# Altium footprint library PcbLib1.PcbLib: 37 footprints (part 3 of 3)
Each footprint in its own frame and in the unit in brackets; x right, y up, seen from the top. Pads: shape width x height; smd on the part's side, far side on the other; paste and mask are expansions set on the pad; w line width, h text height; cw(c..) or ccw(c..) is an arc to the next point about the centre after c.
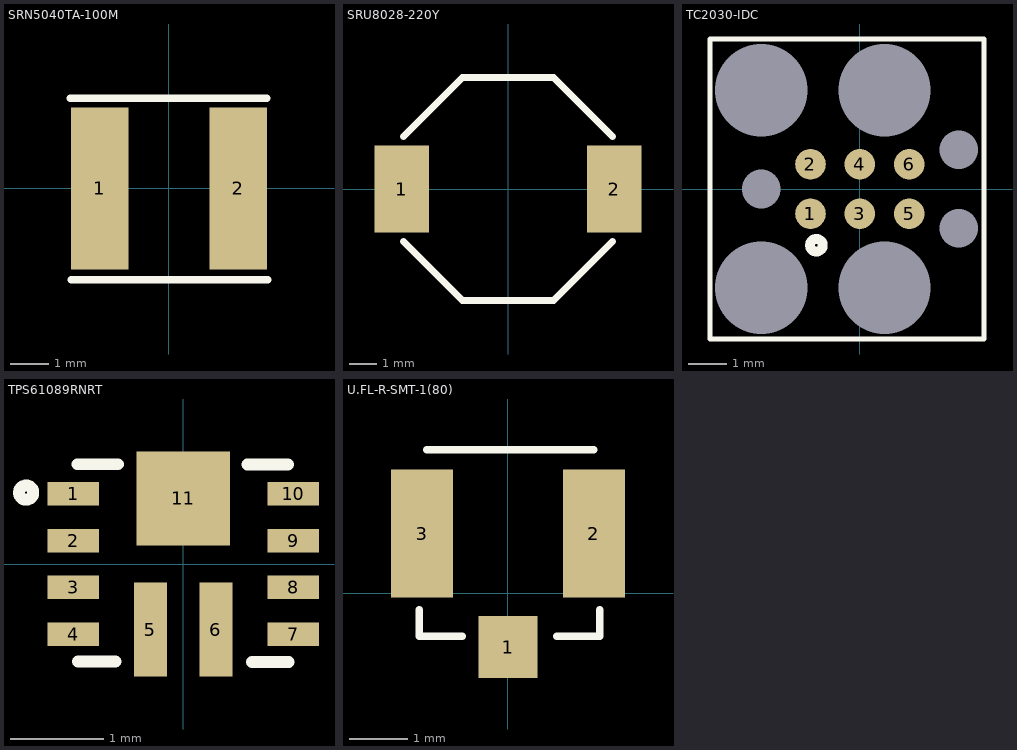
[diagram p2: the footprints below, top view; thin cyan lines are the x and y axes]

## SRN5040TA-100M [mm] "FIXED IND 10UH 2.2A 56 MOHM SMD"
pads (2):
  rect 1.5x4.2 smd: 1(-1.8,0) 2(1.8,0)
Top Overlay:
  lines w0.2: -2.563,2.347 2.538,2.347 ; -2.538,-2.373 2.567,-2.373
3D body "User Library-Bourns_SRN5040TA_series.STEP": height 4.1, standoff 0, extent -2.6,-2.455 2.6,2.455

## SRU8028-220Y [mm]
pads (2):
  rect 2x3.2 smd: 1(-3.9,0) 2(3.9,0)
Top Overlay:
  lines w0.254: -3.835,-1.93 -2.261,-3.505 -1.676,-4.089 1.676,-4.089 2.261,-3.505 3.835,-1.93 ; -3.835,1.93 -2.261,3.505 -1.676,4.089 1.676,4.089 2.261,3.505 3.835,1.93
3D body "sru8028.stp": height 2.78, standoff -0.02, extent -4,-4 4,4

## TC2030-IDC [mm] "CABLE ADAPTER 6 POS"
pads (14):
  round 0.787 smd: 1(-1.27,-0.635) 1(-1.27,-0.635) 2(-1.27,0.635) 3(0,-0.635) 4(0,0.635) 5(1.27,-0.635) 6(1.27,0.635)
  round 0 hole 2.375 unplated mask+0.102: MP1(-2.54,-2.54) MP2(0.635,-2.54) MP3(0.635,2.54) MP4(-2.54,2.54)
  round 0 hole 0.991 unplated mask+0.102: MP5(-2.54,0) MP6(2.54,-1.016) MP7(2.54,1.016)
Top Overlay:
  circle w0.254: c-1.118,-1.448 r0.163
  lines w0.127: -3.861,-3.861 3.2,-3.861 3.2,3.861 -3.861,3.861 -3.861,-3.861

## TPS61089RNRT [mm] "IC REG BOOST ADJ 7A 11VQFN"
pads (11):
  rect 0.55x0.25 smd: 1(-1.175,0.75) 2(-1.175,0.25) 3(-1.175,-0.25) 4(-1.175,-0.75) 7(1.175,-0.75) 8(1.175,-0.25) 9(1.175,0.25) 10(1.175,0.75)
  rect 0.35x1 smd: 5(-0.35,-0.7) 6(0.35,-0.7)
  rect 1x1 smd: 11(0,0.7)
Top Overlay:
  circle w0.127: c-1.676,0.762 r0.076
  lines w0.127: -1.13,1.065 -0.694,1.065 ; -1.122,-1.042 -0.722,-1.042 ; 0.684,1.06 1.121,1.06 ; 0.736,-1.045 1.127,-1.045
3D body "TPS61089RNRT.STEP": height 1, standoff 0, extent -1.25,-1 1.25,1

## U.FL-R-SMT-1(80) [mm]
pads (3):
  rect 1.02x1.07 smd: 1(0,-0.923)
  rect 1.07x2.2 smd: 2(1.475,1.025) 3(-1.475,1.025)
Top Overlay:
  lines w0.127: -1.524,-0.279 -1.524,-0.737 -0.787,-0.737 ; -1.397,2.464 1.473,2.464 ; 0.838,-0.737 1.575,-0.737 1.575,-0.279
3D body "U.FL-R-SMT-1.stp": height 1.2, standoff -0.05, extent -1.475,-0.686 1.525,2.414